# Altium integrated library Fred_Library1.IntLib: 50 symbols (part 2 of 2)
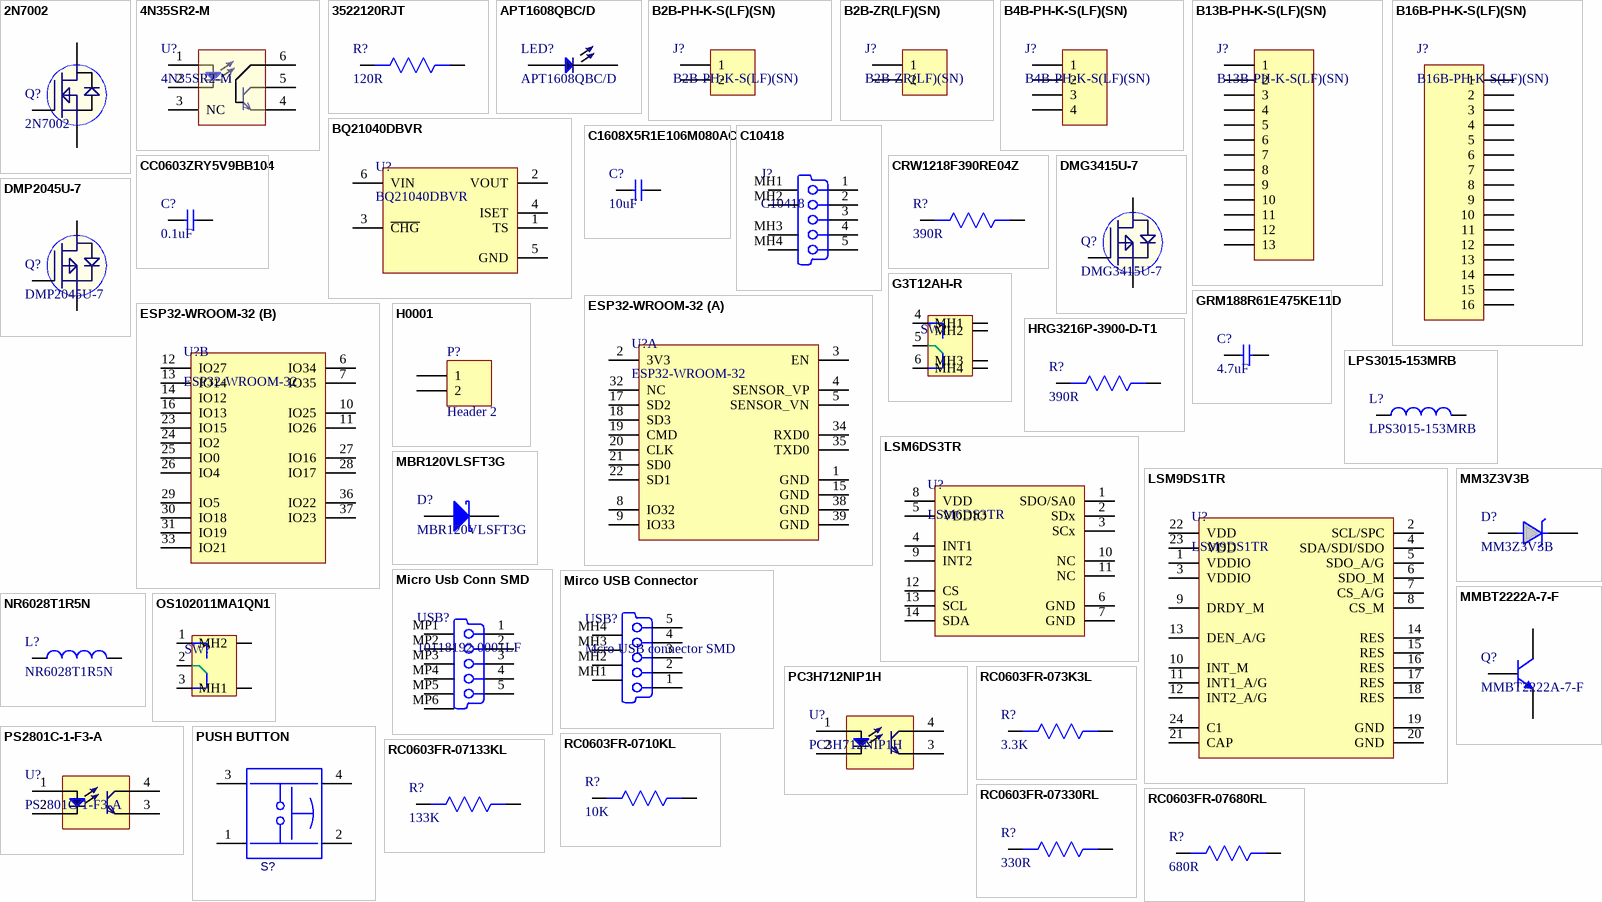
[diagram p2: symbols 2N7002 to RC0603FR-07680RL]

## PUSH BUTTON
designator S?, comment TL3301NF160QG/TR  (value not drawn)
PUSH BUTTON; MANUFACTURER: E-SWITCH; Manufacturer Part Number: FSM4JSMATR; Mechanical Life: 100000Cycles; Contact Current Rating: 50mA; Operating Force: 160gf; Voltage Rating (DC): 24V; Max Voltage Rating (DC): 12V; Illumination Type: Non-Illuminated,Illuminated; Throw Configuration: SPST; Contact Resistance: 100mR; Capacitance: 0f; Switch Travel: 0.25mm; Switch Function: Off-Mom; MANUFACTURER P/N: TL3301NF160QG/TR; PACKAGE: 4-PIN SMT; Supplier 1: Digi-Key; Stock 1: 28989; Pricing 1: 1=0.31, 10=0.298, 25=0.288, 50=0.2778, 100=0.2623, 250=0.2468, 500=0.2366 (USD); Mount: Surface Mount; Min Operating Temperature: -35°C; Max Operating Temperature: 85°C; Package Quantity: 1200; Termination: Gull Wing; Orientation: Straight; Current Rating: 50mA; Electrical Life: 100000Cycles; Type: Switch; REACH SVHC: Unknown; ComponentLink1URL: https://datasheet.ciiva.com/5801/eng-cd-2-1437565-7-u2-5801346.pdf; ComponentLink1Description: https://datasheet.ciiva.com/5801/eng-cd-2-1437565-7-u2-5801346.pdf; ComponentLink2URL: https://datasheet.ciiva.com/22637/1686071-22637243.pdf; ComponentLink2Description: https://datasheet.ciiva.com/22637/1686071-22637243.pdf; ComponentLink3URL: https://datasheet.ciiva.com/2899/fsmseries-2899467.pdf; ComponentLink3Description: https://datasheet.ciiva.com/2899/fsmseries-2899467.pdf; ComponentLink4URL: https://datasheet.ciiva.com/7638/921681-7638037.pdf; ComponentLink4Description: https://datasheet.ciiva.com/7638/921681-7638037.pdf; ComponentLink5URL: https://datasheet.ciiva.com/46381/921681-46381957.pdf; ComponentLink5Description: https://datasheet.ciiva.com/46381/921681-46381957.pdf; ComponentLink6URL: https://datasheet.ciiva.com/24394/eng-cat-1308390-0904-e3-e10-24394982.pdf; ComponentLink6Description: https://datasheet.ciiva.com/24394/eng-cat-1308390-0904-e3-e10-24394982.pdf; ComponentLink7URL: https://datasheet.ciiva.com/2899/fsmseries-2899466.pdf; ComponentLink7Description: https://datasheet.ciiva.com/2899/fsmseries-2899466.pdf; Supplier Part Number 1: 450-1759-1-ND
footprint PUSH BUTTON (4-Pin SMT)
pins: 1, 2, 3, 4

## RC0603FR-073K3L
designator R?, comment 3.3K
RES SMD 3.3K OHM 1% 1/10W 0603; Manufacturer: Yageo Phycomp; Manufacturer Part Number: RC0603FR-073K3L; Temperature Coefficient: 100ppm/°C; Resistance: 3.3kR; Voltage Rating (DC): 50V; Power Rating: 100mW; Supplier 1: Digi-Key; Stock 1: 6863000; Pricing 1: 1=0.1, 10=0.024, 100=0.0097, 1000=0.00437, 2500=0.00379 (USD); Mount: Surface Mount; Case/Package: 0603; Number of Pins: 2; Min Operating Temperature: -55°C; Max Operating Temperature: 155°C; Tolerance: 1%; Packaging: Cut Tape; Length: 1.6mm; Height: 0.45mm; Width: 800um; Depth: 0.8mm; REACH SVHC: No SVHC; Lead Free: Lead Free; Supplier Part Number 1: 311-3.30KHRCT-ND
footprint Res0603
pins: 1, 2

## RC0603FR-0710KL
designator R?, comment 10K
RES SMD 10K OHM 1% 1/10W 0603; Manufacturer: Yageo; Manufacturer Part Number: RC0603FR-0710KL; Resistance: 10kR; Temperature Coefficient: 100ppm/°C; Voltage Rating (DC): 50V; Power Rating: 100mW; Voltage Rating: 75V; Supplier 1: Digi-Key; Stock 1: 144725424; Pricing 1: 1=0.1, 10=0.024, 100=0.0097, 1000=0.00437, 2500=0.00379 (USD); Case/Package: 0603; Number of Pins: 2; Weight: 7.1E-05oz; Case Code (Imperial): 0603; Case Code (Metric): 1608; Min Operating Temperature: -55°C; Max Operating Temperature: 155°C; Tolerance: 1%; Composition: Thick Film; Packaging: Tape and Reel; Military Standard: Not; Termination: SMD/SMT; Length: 1.6mm; Height: 0.45mm; Width: 0.8mm; Depth: 0.8mm; Lead Pitch: 0.3mm; REACH SVHC: No SVHC; Lead Free: Lead Free; ComponentLink1URL: http://www.farnell.com/datasheets/38590.pdf?src-supplier=Element14; ComponentLink1Description: http://www.farnell.com/datasheets/38590.pdf?src-supplier=Element14; ComponentLink2URL: https://www.verical.com/server-webapp/html/getDatasheet?partID=409289&src-supplier=Verical; ComponentLink2Description: https://www.verical.com/server-webapp/html/getDatasheet?partID=409289&src-supplier=Verical; ComponentLink3URL: http://www.farnell.com/datasheets/1868787.pdf?src-supplier=Element14; ComponentLink3Description: http://www.farnell.com/datasheets/1868787.pdf?src-supplier=Element14; ComponentLink4URL: http://www.farnell.com/datasheets/2167052.pdf?src-supplier=Element14; ComponentLink4Description: http://www.farnell.com/datasheets/2167052.pdf?src-supplier=Element14; ComponentLink5URL: http://www.farnell.com/datasheets/443971.pdf?src-supplier=Element14; ComponentLink5Description: http://www.farnell.com/datasheets/443971.pdf?src-supplier=Element14; Supplier Part Number 1: 311-10.0KHRDKR-ND
footprint Res0603
pins: 1, 2

## RC0603FR-07133KL
designator R?, comment 133K
RES SMD 133K OHM 1% 1/10W 0603; Manufacturer: Yageo; Manufacturer Part Number: RC0603FR-07133KL; Resistance: 133kR; Power Rating: 100mW; Voltage Rating: 50V; Temperature Coefficient: 100ppm/°C; Supplier 1: Digi-Key; Stock 1: 1119965; Pricing 1: 1=0.1, 10=0.024, 100=0.0097, 1000=0.00437, 2500=0.00379 (USD); Case/Package: 0603; Case Code (Metric): 1608; Case Code (Imperial): 0603; Min Operating Temperature: -55°C; Max Operating Temperature: 155°C; Tolerance: 1%; Package Quantity: 1; Packaging: Tape and Reel; Composition: Thick Film; Number of Terminations: 2; Termination: SMD/SMT; Military Standard: Not; Max Power Dissipation: 100mW; Voltage Rating (DC): 50V; Features: Moisture Resistant; Length: 1.6mm; Height: 0.022inch; Width: 0.031inch; Depth: 0.8mm; Lead Free: Lead Free; ComponentLink1URL: http://www.yageo.com/documents/recent/PYu-RC_Group_51_RoHS_L_10.pdf?src-supplier=Digi-Key; ComponentLink1Description: http://www.yageo.com/documents/recent/PYu-RC_Group_51_RoHS_L_10.pdf?src-supplier=Digi-Key; ComponentLink2URL: http://www.yageo.com/documents/recent/PYu-RC_Group_51_RoHS_L_9.pdf?src-supplier=Digi-Key; ComponentLink2Description: http://www.yageo.com/documents/recent/PYu-RC_Group_51_RoHS_L_9.pdf?src-supplier=Digi-Key; ComponentLink3URL: http://www.mouser.com/catalog/specsheets/RC0603.pdf?src-supplier=Mouser; ComponentLink3Description: http://www.mouser.com/catalog/specsheets/RC0603.pdf?src-supplier=Mouser; Supplier Part Number 1: 311-133KHRCT-ND
footprint Res0603
pins: 1, 2

## RC0603FR-07330RL
designator R?, comment 330R
RES SMD 330 OHM 1% 1/10W 0603; Manufacturer: Yageo; Manufacturer Part Number: RC0603FR-07330RL; Temperature Coefficient: 100ppm/°C; Voltage Rating (DC): 50V; Power Rating: 100mW; Supplier 1: Digi-Key; Stock 1: 9084897; Pricing 1: 1=0.1, 10=0.024, 100=0.0097, 1000=0.00437, 2500=0.00379 (USD); Case/Package: 0603; Number of Pins: 2; Case Code (Metric): 1608; Case Code (Imperial): 0603; Min Operating Temperature: -55°C; Max Operating Temperature: 155°C; Resistance: 330R; Tolerance: 1%; Composition: Thick Film; Packaging: Tape and Reel; Voltage Rating: 50V; Package Quantity: 1; Number of Terminations: 2; Termination: SMD/SMT; Max Power Dissipation: 100mW; Features: Moisture Resistant; Length: 1.6mm; Height: 0.45mm; Width: 0.8mm; Depth: 0.8mm; REACH SVHC: No SVHC; Lead Free: Lead Free; ComponentLink1URL: http://www.yageo.com/documents/recent/PYu-RC_Group_51_RoHS_L_10.pdf?src-supplier=Digi-Key; ComponentLink1Description: http://www.yageo.com/documents/recent/PYu-RC_Group_51_RoHS_L_10.pdf?src-supplier=Digi-Key; ComponentLink2URL: http://www.farnell.com/datasheets/2167052.pdf?src-supplier=Mouser; ComponentLink2Description: http://www.farnell.com/datasheets/2167052.pdf?src-supplier=Mouser; ComponentLink3URL: http://www.farnell.com/datasheets/1868787.pdf?src-supplier=Element14; ComponentLink3Description: http://www.farnell.com/datasheets/1868787.pdf?src-supplier=Element14; ComponentLink4URL: http://www.farnell.com/datasheets/443971.pdf?src-supplier=Element14; ComponentLink4Description: http://www.farnell.com/datasheets/443971.pdf?src-supplier=Element14; ComponentLink5URL: http://www.farnell.com/datasheets/1686128.pdf?src-supplier=Element14; ComponentLink5Description: http://www.farnell.com/datasheets/1686128.pdf?src-supplier=Element14; ComponentLink6URL: http://documents.rs-components.com/techlib://itc_doclist_GB.htm?stockno=5046499&src-supplier=RSComponents; ComponentLink6Description: http://documents.rs-components.com/techlib://itc_doclist_GB.htm?stockno=5046499&src-supplier=RSComponents; Supplier Part Number 1: 311-330HRCT-ND
footprint Res0603
pins: 1, 2

## RC0603FR-07680RL
designator R?, comment 680R
RES SMD 680 OHM 1% 1/10W 0603; Manufacturer: Yageo; Manufacturer Part Number: RC0603FR-07680RL; Temperature Coefficient: 100ppm/°C; Voltage Rating (DC): 50V; Power Rating: 100mW; Supplier 1: Digi-Key; Stock 1: 4278227; Pricing 1: 1=0.1, 10=0.024, 100=0.0097, 1000=0.00437, 2500=0.00379 (USD); Case/Package: 0603; Number of Pins: 2; Case Code (Imperial): 0603; Case Code (Metric): 1608; Min Operating Temperature: -55°C; Max Operating Temperature: 155°C; Resistance: 680R; Tolerance: 1%; Composition: Thick Film; Packaging: Tape and Reel; Number of Terminations: 2; Military Standard: Not; Voltage Rating: 50V; Package Quantity: 1; Termination: SMD/SMT; Max Power Dissipation: 100mW; Features: Moisture Resistant; Length: 1.6mm; Height: 0.022inch; Width: 0.031inch; Depth: 0.8mm; REACH SVHC: No SVHC; Lead Free: Lead Free; ComponentLink1URL: http://www.farnell.com/datasheets/1868787.pdf?src-supplier=Element14; ComponentLink1Description: http://www.farnell.com/datasheets/1868787.pdf?src-supplier=Element14; ComponentLink2URL: http://documents.rs-components.com/techlib://itc_doclist_GB.htm?stockno=5048221&src-supplier=RSComponents; ComponentLink2Description: http://documents.rs-components.com/techlib://itc_doclist_GB.htm?stockno=5048221&src-supplier=RSComponents; ComponentLink3URL: http://www.farnell.com/datasheets/443971.pdf?src-supplier=Element14; ComponentLink3Description: http://www.farnell.com/datasheets/443971.pdf?src-supplier=Element14; ComponentLink4URL: http://www.yageo.com/documents/recent/PYu-RC_Group_51_RoHS_L_10.pdf?src-supplier=Digi-Key; ComponentLink4Description: http://www.yageo.com/documents/recent/PYu-RC_Group_51_RoHS_L_10.pdf?src-supplier=Digi-Key; Supplier Part Number 1: 311-680HRCT-ND
footprint Res0603
pins: 1, 2

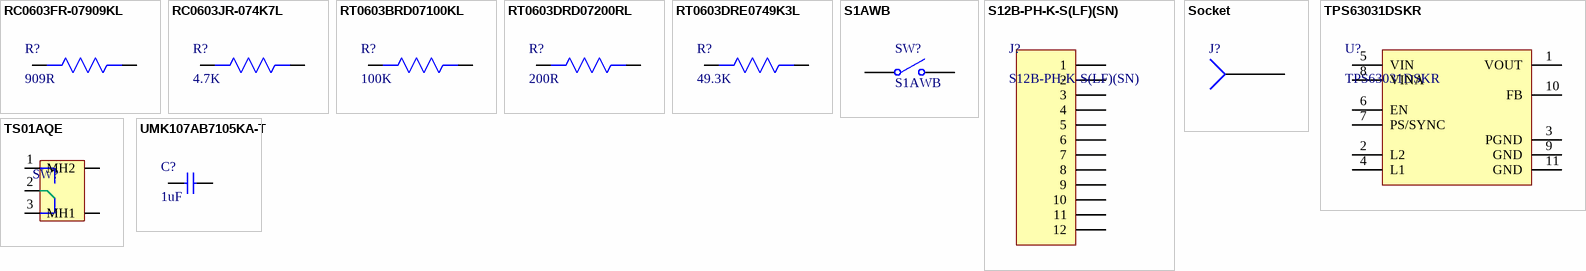
[diagram p1: symbols RC0603FR-07909KL to UMK107AB7105KA-T]

## RC0603FR-07909KL
designator R?, comment 909R
RES SMD 909K OHM 1% 1/10W 0603; Manufacturer: Yageo; Manufacturer Part Number: RC0603FR-07909KL; Resistance: 909kR; Temperature Coefficient: 100ppm/°C; Power Rating: 100mW; Voltage Rating: 75V; Voltage Rating (DC): 50V; Supplier 1: Digi-Key; Stock 1: 151193; Pricing 1: 1=0.1, 10=0.024, 100=0.0097, 1000=0.00437, 2500=0.00379 (USD); Case/Package: 0603; Weight: 7.1E-05oz; Contact Plating: Matte,Tin; Case Code (Metric): 1608; Case Code (Imperial): 0603; Min Operating Temperature: -55°C; Max Operating Temperature: 155°C; Tolerance: 1%; Composition: Thick Film; Package Quantity: 1; Packaging: Tape and Reel; Number of Terminations: 2; Termination: SMD/SMT; Military Standard: Not; Max Power Dissipation: 100mW; Features: Moisture Resistant; Length: 1.6mm; Height: 0.022inch; Width: 0.031inch; Depth: 0.8mm; Lead Free: Lead Free; ComponentLink1URL: http://www.yageo.com.tw/exep/pages/download/literatures/PYu-R_INT-thick_7.pdf?src-supplier=Digi-Key; ComponentLink1Description: http://www.yageo.com.tw/exep/pages/download/literatures/PYu-R_INT-thick_7.pdf?src-supplier=Digi-Key; ComponentLink2URL: http://www.yageo.com/documents/recent/PYu-RC_Group_51_RoHS_L_10.pdf?src-supplier=Digi-Key; ComponentLink2Description: http://www.yageo.com/documents/recent/PYu-RC_Group_51_RoHS_L_10.pdf?src-supplier=Digi-Key; ComponentLink3URL: http://www.yageo.com/documents/recent/PYu-RC_Group_51_RoHS_L_9.pdf?src-supplier=Digi-Key; ComponentLink3Description: http://www.yageo.com/documents/recent/PYu-RC_Group_51_RoHS_L_9.pdf?src-supplier=Digi-Key; ComponentLink4URL: http://www.yageo.com/documents/recent/PYu-RC0603_51_RoHS_L_4.pdf?src-supplier=Avnet+Europe; ComponentLink4Description: http://www.yageo.com/documents/recent/PYu-RC0603_51_RoHS_L_4.pdf?src-supplier=Avnet+Europe; ComponentLink5URL: http://www.yageo.com/documents/recent/PYu-RC0603_51_RoHS_L_4.pdf?src-supplier=Avnet; ComponentLink5Description: http://www.yageo.com/documents/recent/PYu-RC0603_51_RoHS_L_4.pdf?src-supplier=Avnet; Supplier Part Number 1: 311-909KHRDKR-ND
footprint Res0603
pins: 1, 2

## RC0603JR-074K7L
designator R?, comment 4.7K
RES SMD 4.7K OHM 5% 1/10W 0603; Manufacturer: Yageo; Manufacturer Part Number: RC0603JR-074K7L; Resistance: 4.7kR; Temperature Coefficient: 100ppm/°C; Voltage Rating (DC): 50V; Power Rating: 100mW; Supplier 1: Digi-Key; Stock 1: 19706643; Pricing 1: 1=0.1, 10=0.02, 100=0.0081, 1000=0.00362, 2500=0.00314 (USD); Case/Package: 0603; Number of Pins: 2; Case Code (Imperial): 0603; Case Code (Metric): 1608; Min Operating Temperature: -55°C; Max Operating Temperature: 155°C; Tolerance: 5%; Composition: Thick Film; Packaging: Tape and Reel; Voltage Rating: 50V; Termination: SMD/SMT; Military Standard: Not; Length: 1.6mm; Width: 0.8mm; Depth: 0.8mm; REACH SVHC: No SVHC; Lead Free: Lead Free; ComponentLink1URL: http://www.farnell.com/datasheets/443971.pdf?src-supplier=Element14; ComponentLink1Description: http://www.farnell.com/datasheets/443971.pdf?src-supplier=Element14; Supplier Part Number 1: 311-4.7KGRCT-ND
footprint Res0603
pins: 1, 2

## RT0603BRD07100KL
designator R?, comment 100K
RES SMD 100K OHM 0.1% 1/10W 0603; Manufacturer: Yageo; Manufacturer Part Number: RT0603BRD07100KL; Resistance: 100kR; Temperature Coefficient: 25ppm/°C; Voltage Rating (DC): 75V; Power Rating: 100mW; Supplier 1: Digi-Key; Stock 1: 53395; Pricing 1: 1=0.39, 10=0.332, 100=0.1298, 1000=0.05435, 2500=0.04982 (USD); Mount: Surface Mount; Case/Package: 0603; Case Code (Imperial): 0603; Case Code (Metric): 1608; Min Operating Temperature: -55°C; Max Operating Temperature: 125°C; Tolerance: 0.1%; Composition: Thin Film; Packaging: Tape and Reel; Voltage Rating: 75V; Package Quantity: 5000; Termination: SMD/SMT; Number of Terminations: 2; Military Standard: Not; Max Power Dissipation: 100mW; Working Voltage: 75V; Features: Moisture Resistant; Length: 1.6mm; Height: 0.022inch; Width: 0.031inch; Depth: 0.8mm; Lead Free: Lead Free; ComponentLink1URL: http://documents.rs-components.com/techlib://itc_doclist_GB.htm?stockno=6174810&src-supplier=RSComponents; ComponentLink1Description: http://documents.rs-components.com/techlib://itc_doclist_GB.htm?stockno=6174810&src-supplier=RSComponents; Supplier Part Number 1: YAG1235CT-ND
footprint Res0603
pins: 1, 2

## RT0603DRD07200RL
designator R?, comment 200R
RES SMD 200 OHM 0.5% 1/10W 0603; Manufacturer: Yageo; Manufacturer Part Number: RT0603DRD07200RL; Power Rating: 100mW; Voltage Rating (DC): 50V; Supplier 1: Digi-Key; Stock 1: 19572; Pricing 1: 1=0.21, 10=0.174, 100=0.0682, 1000=0.02855, 2500=0.02617 (USD); Case/Package: 0603; Resistance: 200R; Tolerance: 0.5%; Packaging: Cut Tape; Lead Free: Lead Free; Supplier Part Number 1: 311-200DCT-ND
footprint Res0603
pins: 1, 2

## RT0603DRE0749K3L
designator R?, comment 49.3K
Thin Film Resistors - SMD 1/10W 49.3K Ohms .5%; Manufacturer: Yageo; Manufacturer Part Number: RT0603DRE0749K3L; Resistance: 49.3kR; Tolerance: 0.5%; Supplier 1: Mouser; Stock 1: 12765; Pricing 1: 1=0.16, 10=0.09, 50=0.09, 100=0.03, 1000=0.03, 10000=0.02 (USD); Case/Package: 0603; Supplier Part Number 1: 603-RT0603DRE0749K3L
footprint Res0603
pins: 1, 2

## S1AWB
designator SW?
Toggle Switch SPST Panel Mount ON-NONE-OFF 20A @ 30VDC, Panel Mount, Solder Lug, IP68 Waterproof; Manufacturer: NKK Switches; Illumination Type: Non-Illuminated; Switch Function: On-Off; Voltage Rating (AC): 125V; Voltage Rating (DC): 30V; Actuator Type: Standard Round; Electrical Life: 25000Cycles; Actuator Length: 17.5mm; Ratings: IP68,Waterproof,Dust Tight; Supplier 1: Digi-Key; Manufacturer Part Number: S1AWB; Stock 1: 54; Pricing 1: 1=17.45, 10=16.503, 25=16.0312, 50=15.5596, 100=15.088, 250=14.6165, 500=12.259 (USD); Mount: Panel; Min Operating Temperature: -30°C; Max Operating Temperature: 70°C; Throw Configuration: SPST; Packaging: Bulk; Current Rating: 20A; Termination: Solder; Supplier Part Number 1: 360-4084-ND
footprint S1AWB (Toggle Switch SPST Panel Mount ON-NONE-OFF 20A @ 30VDC, Panel Mount, Solder Lug, IP68 Waterproof)
pins: 1, 3

## S12B-PH-K-S(LF)(SN)
designator J?
CONN HEADER R/A 12POS 2MM; Manufacturer: JST; Current Rating: 2A; Number of Positions: 12; Gender: Male; Connector Type: Male Pin; Pitch: 0.079inch; Supplier 1: Digi-Key; Manufacturer Part Number: S12B-PH-K-S(LF)(SN); Stock 1: 1305; Pricing 1: 1=0.52, 10=0.488, 100=0.3742, 500=0.3254, 1000=0.26845, 5000=0.23591, 10000=0.21964 (USD); Mount: Through Hole; Number of Pins: 12; Contact Material: Brass,Tin; Contact Plating: Tin; Color: Natural; Housing Color: Natural; Number of Rows: 1; Packaging: Bulk; Termination: Press-Fit; Fastening Type: Detent; Number of Contacts: 12; Length: 25.9mm; Height: 9.4mm; Width: 4.5mm; Contact Mating Length: 0.13inch; REACH SVHC: No SVHC; Lead Free: Lead Free; ComponentLink1URL: http://www.jst-mfg.com/product/pdf/eng/ePH.pdf?src-supplier=Digi-Key; ComponentLink1Description: http://www.jst-mfg.com/product/pdf/eng/ePH.pdf?src-supplier=Digi-Key; ComponentLink2URL: http://www.produktinfo.conrad.com/datenblaetter/725000-749999/740507-da-01-en-STIFTLEISTE_GEWINKELT_12_POL_RM2_0.pdf?src-supplier=Conrad; ComponentLink2Description: http://www.produktinfo.conrad.com/datenblaetter/725000-749999/740507-da-01-en-STIFTLEISTE_GEWINKELT_12_POL_RM2_0.pdf?src-supplier=Conrad; Supplier Part Number 1: 455-1729-ND
footprint S12B-PH-K-S(LF)(SN) (CONN HEADER R/A 12POS 2MM)
pins: 1, 2, 3, 4, 5, 6, 7, 8, 9, 10, 11, 12

## Socket
designator J?
Socket; LatestRevisionDate: 17-Jul-2002; LatestRevisionNote: Re-released for DXP Platform.; Publisher: Altium Limited
footprint Socket
pins: 1

## TPS63031DSKR
designator U?
Conv DC-DC 1.8V to 5.5V Non-Inv/Inv/Step Up/Step Down Single-Out 3.3V 0.8A 10-Pin WSON; Manufacturer: Texas Instruments; Switching Frequency: 2.4MHz; Output Current: 800mA; Number of Outputs: 1; Synchronous Rectifier: Yes; Quiescent Current: 25uA; Output Type: Fixed; Efficiency: 96%; Topology: Buck-Boost; Output Configuration: Positive; ComponentLink1URL: http://www.ti.com/lit/ds/symlink/tps63001.pdf; ComponentLink1Description: http://www.ti.com/lit/ds/symlink/tps63001.pdf; ComponentLink2URL: http://focus.ti.com/lit/ds/symlink/tps63001.pdf; ComponentLink2Description: http://focus.ti.com/lit/ds/symlink/tps63001.pdf; ComponentLink3URL: http://www.ti.com/general/docs/lit/getliterature.tsp?genericPartNumber=TPS63002&&fileType=pdf; ComponentLink3Description: http://www.ti.com/general/docs/lit/getliterature.tsp?genericPartNumber=TPS63002&&fileType=pdf; Supplier 1: Arrow; Manufacturer Part Number: TPS63031DSKR; Stock 1: 0; Mount: Surface Mount; Number of Pins: 10; Contact Plating: Gold; Min Operating Temperature: -40°C; Max Operating Temperature: 85°C; Output Voltage: 3.3V; Min Input Voltage: 1.8V; Packaging: Tape and Reel; Package Quantity: 3000; Max Output Current: 800mA; Max Input Voltage: 5.5V; Operating Supply Voltage: 5.5V; Min Output Voltage: 3.3V; Nominal Output Voltage: 3.3V; Radiation Hardening: No; Lead Free: Lead Free; REACH SVHC: No SVHC; ComponentLink4URL: http://www.ti.com/general/docs/lit/getliterature.tsp?genericPartNumber=TPS63031&&fileType=pdf&src-supplier=Avnet; ComponentLink4Description: http://www.ti.com/general/docs/lit/getliterature.tsp?genericPartNumber=TPS63031&&fileType=pdf&src-supplier=Avnet; ComponentLink5URL: http://www.ti.com/lit/ds/symlink/tps63030.pdf?src-supplier=Digi-Key; ComponentLink5Description: http://www.ti.com/lit/ds/symlink/tps63030.pdf?src-supplier=Digi-Key; Supplier Part Number 1: TPS63031DSKR**MULT1
footprint TPS63031DSKR (Conv DC-DC 1.8V to 5.5V Non-Inv/Inv/Step Up/Step Down Single-Out 3.3V 0.8A 10-Pin WSON)
pins: 1 VOUT, 2 L2, 3 PGND, 4 L1, 5 VIN, 6 EN, 7 PS/SYNC, 8 VINA, 9 GND, 10 FB, 11 GND

## TS01AQE
designator SW?  (value not drawn)
2 Position SPDT Miniature Slide Switch 3A 120V Through Hole, Right Angle; Manufacturer: ITT C&K; Actuator Material: Nylon,Polyamide; Voltage Rating (DC): 28V; Electrical Life: 60000Cycles; Switch Travel: 3.05mm; Switch Function: On-On; Actuator Type: Standard; Actuator Length: 3.1mm; ComponentLink1URL: http://www.jameco.com/Jameco/Products/ProdDS/588220.pdf?src-supplier=Jameco; ComponentLink1Description: http://www.jameco.com/Jameco/Products/ProdDS/588220.pdf?src-supplier=Jameco; ComponentLink2URL: http://uk.rs-online.com/webdocs/1263/0900766b81263f61.pdf?src-supplier=RSComponents; ComponentLink2Description: http://uk.rs-online.com/webdocs/1263/0900766b81263f61.pdf?src-supplier=RSComponents; ComponentLink3URL: http://www.farnell.com/datasheets/1683358.pdf?src-supplier=Element14; ComponentLink3Description: http://www.farnell.com/datasheets/1683358.pdf?src-supplier=Element14; ComponentLink4URL: http://www1.futureelectronics.com/doc/C%20-%20K%20COMPONENTS/OS102011MA1QN1.pdf?src-supplier=Future+Electronics; ComponentLink4Description: http://www1.futureelectronics.com/doc/C%20-%20K%20COMPONENTS/OS102011MA1QN1.pdf?src-supplier=Future+Electronics; ComponentLink5URL: https://www.ckswitches.com/media/1428/os.pdf?src-supplier=Digi-Key; ComponentLink5Description: https://www.ckswitches.com/media/1428/os.pdf?src-supplier=Digi-Key; ComponentLink6URL: https://www.alliedelec.com/m/d/08271ccc8b1809c6b911a7d3c93f3e8a.pdf?src-supplier=Allied+Electronics; ComponentLink6Description: https://www.alliedelec.com/m/d/08271ccc8b1809c6b911a7d3c93f3e8a.pdf?src-supplier=Allied+Electronics; ComponentLink7URL: http://www.farnell.com/datasheets/2674787.pdf?src-supplier=Newark; ComponentLink7Description: http://www.farnell.com/datasheets/2674787.pdf?src-supplier=Newark; Supplier 1: Digi-Key; Manufacturer Part Number: TS01AQE; Stock 1: 544; Pricing 1: 1=4.61, 10=4.508, 25=4.3072, 50=3.8064, 100=3.7564, 250=3.7063, 500=3.0552, 1000=2.8549 (USD); Mount: Through Hole,Brackets; Contact Plating: Silver; Contact Material: Copper Alloy,Silver; Housing Material: Stainless Steel; Min Operating Temperature: -30°C; Max Operating Temperature: 85°C; Contact Current Rating: 3A; Packaging: Bulk; Package Quantity: 1; Voltage Rating (AC): 120V; Max Voltage Rating (AC): 120V; Throw Configuration: SPDT; Max Current Rating: 3A; Max Voltage Rating (DC): 28V; Current Rating: 3A; Termination: PC Pins; Orientation: Right Angle; Length: 10.16mm; Depth: 13.13mm; Radiation Hardening: No; Lead Free: Lead Free; ComponentLink8URL: https://www.verical.com/server-webapp/html/getDatasheet?partID=770663&src-supplier=Verical; ComponentLink8Description: https://www.verical.com/server-webapp/html/getDatasheet?partID=770663&src-supplier=Verical; ComponentLink9URL: https://www.ckswitches.com/media/1426/ts.pdf?src-supplier=Digi-Key; ComponentLink9Description: https://www.ckswitches.com/media/1426/ts.pdf?src-supplier=Digi-Key; ComponentLink10URL: http://www.ck-components.com/14392/ts_31aug10.pdf/?src-supplier=Avnet; ComponentLink10Description: http://www.ck-components.com/14392/ts_31aug10.pdf/?src-supplier=Avnet; Supplier Part Number 1: CKC5121-ND
footprint TS01AQE (2 Position SPDT Miniature Slide Switch 3A 120V Through Hole, Right Angle)
pins: 1 +, 2 +, 3 +, MH1, MH2

## UMK107AB7105KA-T
designator C?, comment 1uF
CAP CER 1UF 50V X7R 0603; Manufacturer: Taiyo Yuden; Manufacturer Part Number: UMK107AB7105KA-T; Tolerance: 10%; ComponentLink1URL: http://www.farnell.com/datasheets/2048165.pdf?src-supplier=Element14; ComponentLink1Description: http://www.farnell.com/datasheets/2048165.pdf?src-supplier=Element14; ComponentLink2URL: https://www.murata.com/~/media/webrenewal/support/library/catalog/products/capacitor/mlcc/c02e.ashx?la=en-us&src-supplier=Digi-Key; ComponentLink2Description: https://www.murata.com/~/media/webrenewal/support/library/catalog/products/capacitor/mlcc/c02e.ashx?la=en-us&src-supplier=Digi-Key; Supplier 1: Digi-Key; Stock 1: 453098; Pricing 1: 1=0.28, 10=0.19, 100=0.1079, 500=0.0762, 1000=0.0667 (USD); Mount: Surface Mount; Case/Package: 0603; Case Code (Metric): 1608; Case Code (Imperial): 0603; Min Operating Temperature: -55°C; Max Operating Temperature: 125°C; Packaging: Tape and Reel; Package Quantity: 1; Capacitance: 1uF; Voltage Rating: 50V; Voltage Rating (DC): 50V; Dielectric: X7R; Termination: SMD/SMT; Length: 1.6mm; Height: 0.8mm; Width: 0.031inch; Thickness: 0.037inch; Depth: 0.8mm; Radiation Hardening: No; Halogen Free: Halogen Free; ComponentLink3URL: https://www.yuden.co.jp/productdata/catalog/mlcc_all_e.pdf?src-supplier=Digi-Key; ComponentLink3Description: https://www.yuden.co.jp/productdata/catalog/mlcc_all_e.pdf?src-supplier=Digi-Key; ComponentLink4URL: https://www.yuden.co.jp/productdata/catalog/mlcc_all_e.pdf?src-supplier=Onlinecomponents.com; ComponentLink4Description: https://www.yuden.co.jp/productdata/catalog/mlcc_all_e.pdf?src-supplier=Onlinecomponents.com; Supplier Part Number 1: 587-3247-1-ND
footprint Cap0603
pins: 1, 2